# Altium footprint library TO.PcbLib: 38 footprints (part 3 of 3)
Each footprint in its own frame and in the unit in brackets; x right, y up, seen from the top. Pads: shape width x height; smd on the part's side, far side on the other; paste and mask are expansions set on the pad; w line width, h text height; cw(c..) or ccw(c..) is an arc to the next point about the centre after c.
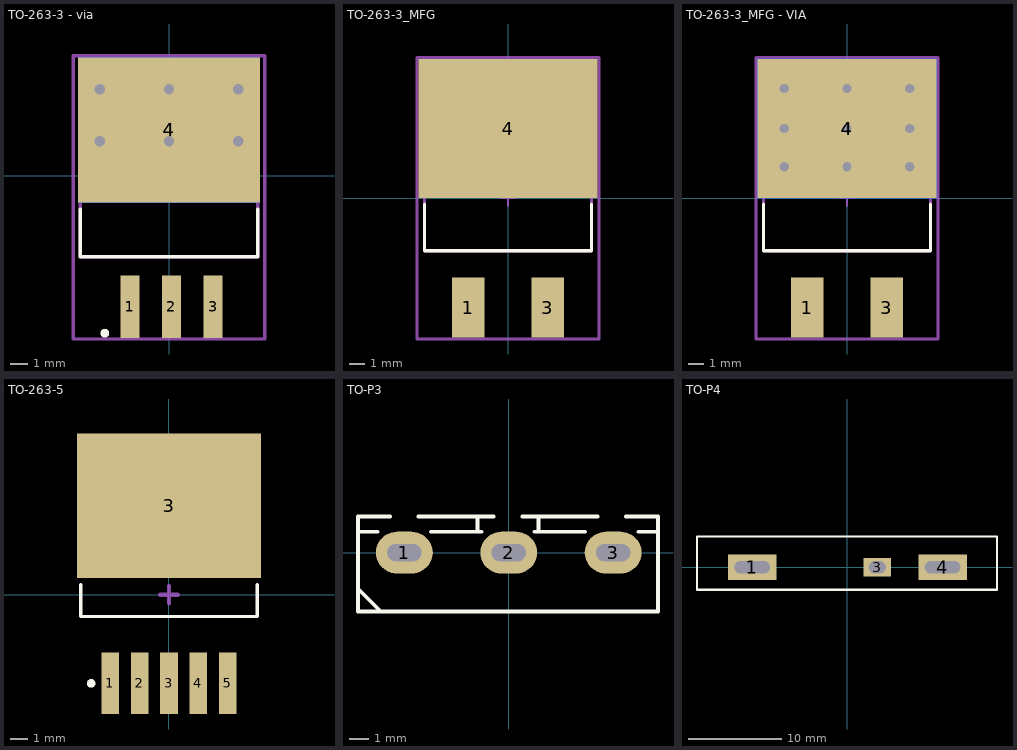
[diagram p2: the footprints below, top view; thin cyan lines are the x and y axes]

## TO-263-3 - via [mm]
pads (5):
  rect 1.1x3.6 smd: 1(-2.253,-7.558) 2(0.144,-7.558) 3(2.54,-7.558)
  rect 10.49x8.38 smd paste+0 mask+0: 4(0,2.655)
  rect 10.49x8.38 smd far side paste+0 mask+0: 4(0,2.655)
via -4,5 diameter 1.2 hole 0.6
via 0,5 diameter 1.2 hole 0.6
via 4,5 diameter 1.2 hole 0.6
via -4,2 diameter 1.2 hole 0.6
via 0,2 diameter 1.2 hole 0.6
via 4,2 diameter 1.2 hole 0.6
Top Overlay:
  circle w0.25: c-3.7,-9.075 r0.125
  lines w0.2: -5.118,-1.91 -5.118,-4.674 5.118,-4.674 5.118,-1.91
Top Courtyard:
  lines w0.2: -5.536,-9.41 5.536,-9.41 5.536,6.945 -5.536,6.945 -5.536,-9.41
  text ".Designator" at 0,-1.233 h1
Mechanical 12:
  lines w0.2: -5.118,-4.674 5.118,-4.674 5.118,4.674 -5.118,4.674 -5.118,-4.674
Mechanical 15:
  lines w0.1: -0.5,0 0.5,0 ; 0,-0.5 0,0.5
  lines w0.2: -5.536,-9.41 5.536,-9.41 5.536,6.945 -5.536,6.945 -5.536,-9.41
3D body "to263-3_p5-08_l10-414_w4-826.stp": height 4.83, standoff -0.01, extent -5.063,-9.132 5.351,6.667

## TO-263-3_MFG [mm]
pads (3):
  rect 2.08x3.81 smd paste+0 mask+0: 1(-2.54,-6.985) 3(2.54,-6.985)
  rect 11.43x8.89 smd paste+0 mask+0: 4(0,4.445)
Top Overlay:
  lines w0.2: -5.335,-0.375 -5.335,-3.36 5.335,-3.36 5.335,-0.375
Top Courtyard:
  lines w0.2: -5.815,-8.99 -5.815,8.99 5.815,8.99 5.815,-8.99 -5.815,-8.99
  text ".Designator" at 0,-0.001 h1
Mechanical 12:
  lines w0.2: -5.335,-3.36 -5.335,6.29 5.335,6.29 5.335,-3.36 -5.335,-3.36
Mechanical 15:
  lines w0.1: -0.5,0 0.5,0 ; 0,-0.5 0,0.5
  lines w0.2: -5.815,-8.99 -5.815,8.99 5.815,8.99 5.815,-8.99 -5.815,-8.99
3D body "Trans_Infineon_IRF3205SPBF_eec.STEP": height 5.09, standoff 0, extent -5.08,-7.658 5.08,7.588

## TO-263-3_MFG - VIA [mm]
pads (4):
  rect 2.08x3.81 smd paste+0 mask+0: 1(-2.54,-6.985) 3(2.54,-6.985)
  rect 11.43x8.89 smd paste+0 mask+0: 4(0,4.445)
  rect 11.43x8.89 smd far side paste+0 mask+0: 4(0,4.445)
via -4,7 diameter 1.2 hole 0.6
via 0,7 diameter 1.2 hole 0.6
via 4,7 diameter 1.2 hole 0.6
via -4,2 diameter 1.2 hole 0.6
via -4,4.445 diameter 1.2 hole 0.6
via 0,4.445 diameter 1.2 hole 0.6
via 4,4.445 diameter 1.2 hole 0.6
via 0,2 diameter 1.2 hole 0.6
via 4,2 diameter 1.2 hole 0.6
Top Overlay:
  lines w0.2: -5.335,-0.375 -5.335,-3.36 5.335,-3.36 5.335,-0.375
Top Courtyard:
  lines w0.2: -5.815,-8.99 -5.815,8.99 5.815,8.99 5.815,-8.99 -5.815,-8.99
  text ".Designator" at 0,-0.001 h1
Mechanical 12:
  lines w0.2: -5.335,-3.36 -5.335,6.29 5.335,6.29 5.335,-3.36 -5.335,-3.36
Mechanical 15:
  lines w0.1: -0.5,0 0.5,0 ; 0,-0.5 0,0.5
  lines w0.2: -5.815,-8.99 -5.815,8.99 5.815,8.99 5.815,-8.99 -5.815,-8.99
3D body "Trans_Infineon_IRF3205SPBF_eec.STEP": height 5.09, standoff 0, extent -5.08,-7.658 5.08,7.588

## TO-263-5 [mil]
pads (6):
  rect 40x140 smd paste+0 mask+0: 1(-134.02,-202.85) 2(-67.01,-202.85) 3(0,-202.85) 4(67.01,-202.85) 5(134.02,-202.85)
  rect 419.69x329.92 smd paste+0 mask+0: 3(0,202.85)
Top Overlay:
  circle w9.84: c-177.87,-202.85 r4.92
  lines w7.87: -201.5,23.13 -201.5,-50 201.5,-50 201.5,23.13
Mechanical 15:
  lines w10: -19.68,0 19.69,0 ; 0,-19.68 0,19.69
3D body "TO263-5-1.stp": height 165.95, standoff 0, extent -193.34,-231.41 193.34,343.47

## TO-P3 [mm]
pads (3):
  oval 3x2.2 hole 0.9 slot 1.8 at 0 deg: 1(-5.5,0) 2(0,0) 3(5.5,0)
Top Overlay:
  lines w0.2: -7.939,-1.9 -6.739,-3.1 ; -7.939,1.1 -6.9,1.1 ; -6.25,1.9 -7.939,1.9 -7.939,-3.1 7.861,-3.1 7.861,1.9 6.172,1.9 ; -4.75,1.9 -0.789,1.9 ; -4.1,1.1 -1.439,1.1 ; -1.639,1.1 -1.639,1.9 ; 0.711,1.9 4.672,1.9 ; 1.361,1.1 4.022,1.1 ; 1.561,1.1 1.561,1.9 ; 6.822,1.1 7.861,1.1
Top Assembly (Mech9):
  text ".Designator" at -4.874,-0.452 h2
3D body "TO-3P-3LD_new.step": height 23.92, standoff -3.48, extent -7.839,-3.003 7.761,1.807

## TO-P4 [mm]
pads (3):
  rect 5.2x2.7 hole 1.3 slot 3.8 at 0 deg: 1(-10.2,0) 4(10.2,0)
  rect 3x2 hole 1.3 slot 1.8 at 0 deg: 3(3.2,0)
Top Overlay:
  lines w0.254: -16.117,-2.393 16.033,-2.393 16.033,3.303 -16.117,3.303 -16.117,-2.393
Mechanical 15:
  text ".Designator" at -4.874,-0.452 h2
3D body "BTA100-800B.step": height 30.5, standoff -9.5, extent -16.042,-2.52 15.958,3.43